# Altium footprint library IC-QFN.PcbLib: 94 footprints (part 5 of 6)
Each footprint in its own frame and in the unit in brackets; x right, y up, seen from the top. Pads: shape width x height; smd on the part's side, far side on the other; paste and mask are expansions set on the pad; w line width, h text height; cw(c..) or ccw(c..) is an arc to the next point about the centre after c.
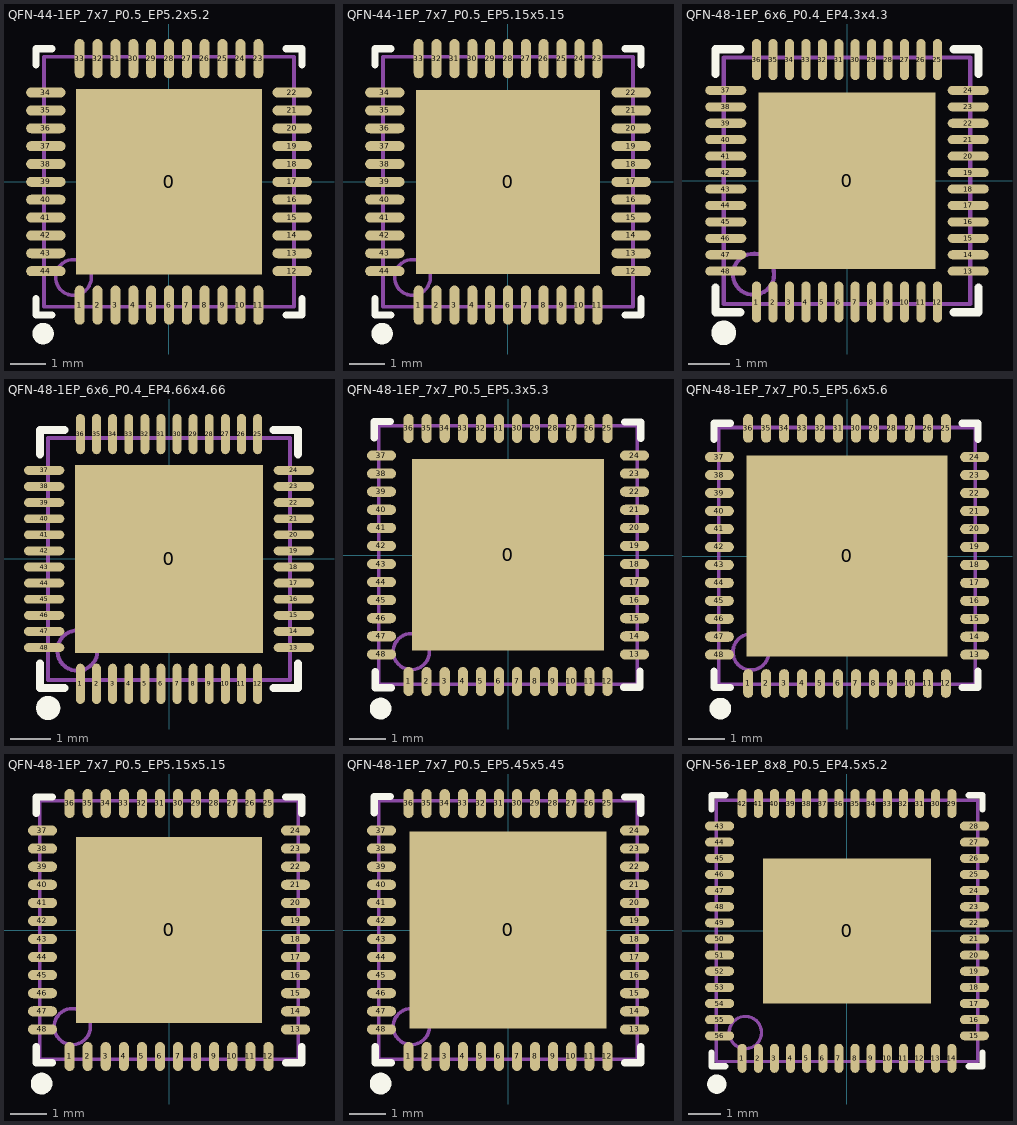
[diagram p4: the footprints below, top view; thin cyan lines are the x and y axes]

## QFN-44-1EP_7x7_P0.5_EP5.2x5.2 [mm]
pads (45):
  rect 5.2x5.2 smd mask+0.051: 0(0,0)
  oval 0.28x1.1 smd mask+0.051: 1(-2.5,-3.45) 2(-2,-3.45) 3(-1.5,-3.45) 4(-1,-3.45) 5(-0.5,-3.45) 6(0,-3.45) 7(0.5,-3.45) 8(1,-3.45) 9(1.5,-3.45) 10(2,-3.45) 11(2.5,-3.45) 23(2.5,3.45) 24(2,3.45) 25(1.5,3.45) 26(1,3.45) 27(0.5,3.45) 28(0,3.45) 29(-0.5,3.45) 30(-1,3.45) 31(-1.5,3.45) 32(-2,3.45) 33(-2.5,3.45)
  oval 1.1x0.28 smd mask+0.051: 12(3.45,-2.5) 13(3.45,-2) 14(3.45,-1.5) 15(3.45,-1) 16(3.45,-0.5) 17(3.45,0) 18(3.45,0.5) 19(3.45,1) 20(3.45,1.5) 21(3.45,2) 22(3.45,2.5) 34(-3.45,2.5) 35(-3.45,2) 36(-3.45,1.5) 37(-3.45,1) 38(-3.45,0.5) 39(-3.45,0) 40(-3.45,-0.5) 41(-3.45,-1) 42(-3.45,-1.5) 43(-3.45,-2) 44(-3.45,-2.5)
Top Overlay:
  circle w0.3: c-3.525,-4.25 r0.15
  lines w0.2: -3.725,-3.275 -3.725,-3.725 -3.275,-3.725 ; -3.725,3.275 -3.725,3.725 -3.275,3.725 ; 3.275,-3.725 3.725,-3.725 3.725,-3.275 ; 3.275,3.725 3.725,3.725 3.725,3.275
Mechanical 13:
  circle w0.1: c-2.675,-2.675 r0.5
  lines w0.1: -3.5,-3.5 3.5,-3.5 3.5,3.5 -3.5,3.5 -3.5,-3.5
3D body "QFN-44-1EP_7x7mm_P0.5mm_EP5.2x5.2mm.step": height 1.1, standoff 0, extent -3.5,-3.5 3.5,3.5

## QFN-44-1EP_7x7_P0.5_EP5.15x5.15 [mm]
pads (45):
  rect 5.15x5.15 smd mask+0.051: 0(0,0)
  oval 0.28x1.1 smd mask+0.051: 1(-2.5,-3.45) 2(-2,-3.45) 3(-1.5,-3.45) 4(-1,-3.45) 5(-0.5,-3.45) 6(0,-3.45) 7(0.5,-3.45) 8(1,-3.45) 9(1.5,-3.45) 10(2,-3.45) 11(2.5,-3.45) 23(2.5,3.45) 24(2,3.45) 25(1.5,3.45) 26(1,3.45) 27(0.5,3.45) 28(0,3.45) 29(-0.5,3.45) 30(-1,3.45) 31(-1.5,3.45) 32(-2,3.45) 33(-2.5,3.45)
  oval 1.1x0.28 smd mask+0.051: 12(3.45,-2.5) 13(3.45,-2) 14(3.45,-1.5) 15(3.45,-1) 16(3.45,-0.5) 17(3.45,0) 18(3.45,0.5) 19(3.45,1) 20(3.45,1.5) 21(3.45,2) 22(3.45,2.5) 34(-3.45,2.5) 35(-3.45,2) 36(-3.45,1.5) 37(-3.45,1) 38(-3.45,0.5) 39(-3.45,0) 40(-3.45,-0.5) 41(-3.45,-1) 42(-3.45,-1.5) 43(-3.45,-2) 44(-3.45,-2.5)
Top Overlay:
  circle w0.3: c-3.525,-4.25 r0.15
  lines w0.2: -3.725,-3.275 -3.725,-3.725 -3.275,-3.725 ; -3.725,3.275 -3.725,3.725 -3.275,3.725 ; 3.275,-3.725 3.725,-3.725 3.725,-3.275 ; 3.275,3.725 3.725,3.725 3.725,3.275
Mechanical 13:
  circle w0.1: c-2.675,-2.675 r0.5
  lines w0.1: -3.5,-3.5 3.5,-3.5 3.5,3.5 -3.5,3.5 -3.5,-3.5
3D body "QFN-44-1EP_7x7mm_P0.5mm_EP5.15x5.15mm.step": height 0.77, standoff 0, extent -3.5,-3.5 3.5,3.5

## QFN-44-1EP_8x8_P0.65_EP6.6x6.6 [mm]

## QFN-44-1EP_8x8_P0.65_EP6.45x6.45 [mm]

## QFN-44-1EP_9x9_P0.65_EP7.5x7.5 [mm]

## QFN-48-1EP_5x5_P0.35_EP3.7x3.7 [mm]

## QFN-48-1EP_6x6_P0.4_EP4.3x4.3 [mm]
pads (49):
  rect 4.3x4.3 smd mask+0.051: 0(0,0)
  oval 0.22x1 smd mask+0.051: 1(-2.2,-2.95) 2(-1.8,-2.95) 3(-1.4,-2.95) 4(-1,-2.95) 5(-0.6,-2.95) 6(-0.2,-2.95) 7(0.2,-2.95) 8(0.6,-2.95) 9(1,-2.95) 10(1.4,-2.95) 11(1.8,-2.95) 12(2.2,-2.95) 25(2.2,2.95) 26(1.8,2.95) 27(1.4,2.95) 28(1,2.95) 29(0.6,2.95) 30(0.2,2.95) 31(-0.2,2.95) 32(-0.6,2.95) 33(-1,2.95) 34(-1.4,2.95) 35(-1.8,2.95) 36(-2.2,2.95)
  oval 1x0.22 smd mask+0.051: 13(2.95,-2.2) 14(2.95,-1.8) 15(2.95,-1.4) 16(2.95,-1) 17(2.95,-0.6) 18(2.95,-0.2) 19(2.95,0.2) 20(2.95,0.6) 21(2.95,1) 22(2.95,1.4) 23(2.95,1.8) 24(2.95,2.2) 37(-2.95,2.2) 38(-2.95,1.8) 39(-2.95,1.4) 40(-2.95,1) 41(-2.95,0.6) 42(-2.95,0.2) 43(-2.95,-0.2) 44(-2.95,-0.6) 45(-2.95,-1) 46(-2.95,-1.4) 47(-2.95,-1.8) 48(-2.95,-2.2)
Top Overlay:
  circle w0.3: c-3,-3.7 r0.15
  lines w0.2: -3.2,-2.6 -3.2,-3.2 -2.6,-3.2 ; -3.2,2.6 -3.2,3.2 -2.6,3.2 ; 2.6,-3.2 3.2,-3.2 3.2,-2.6 ; 2.6,3.2 3.2,3.2 3.2,2.6
Mechanical 13:
  circle w0.1: c-2.275,-2.275 r0.5
  lines w0.1: -3,-3 3,-3 3,3 -3,3 -3,-3
3D body "QFN-48-1EP_6x6mm_P0.4mm_EP4.3x4.3mm.step": height 1.1, standoff 0, extent -3,-3 3,3

## QFN-48-1EP_6x6_P0.4_EP4.66x4.66 [mm]
pads (49):
  rect 4.66x4.66 smd mask+0.051: 0(0,0)
  oval 0.22x1 smd mask+0.051: 1(-2.2,-3.1) 2(-1.8,-3.1) 3(-1.4,-3.1) 4(-1,-3.1) 5(-0.6,-3.1) 6(-0.2,-3.1) 7(0.2,-3.1) 8(0.6,-3.1) 9(1,-3.1) 10(1.4,-3.1) 11(1.8,-3.1) 12(2.2,-3.1) 25(2.2,3.1) 26(1.8,3.1) 27(1.4,3.1) 28(1,3.1) 29(0.6,3.1) 30(0.2,3.1) 31(-0.2,3.1) 32(-0.6,3.1) 33(-1,3.1) 34(-1.4,3.1) 35(-1.8,3.1) 36(-2.2,3.1)
  oval 1x0.22 smd mask+0.051: 13(3.1,-2.2) 14(3.1,-1.8) 15(3.1,-1.4) 16(3.1,-1) 17(3.1,-0.6) 18(3.1,-0.2) 19(3.1,0.2) 20(3.1,0.6) 21(3.1,1) 22(3.1,1.4) 23(3.1,1.8) 24(3.1,2.2) 37(-3.1,2.2) 38(-3.1,1.8) 39(-3.1,1.4) 40(-3.1,1) 41(-3.1,0.6) 42(-3.1,0.2) 43(-3.1,-0.2) 44(-3.1,-0.6) 45(-3.1,-1) 46(-3.1,-1.4) 47(-3.1,-1.8) 48(-3.1,-2.2)
Top Overlay:
  circle w0.3: c-3,-3.7 r0.15
  lines w0.2: -3.2,-2.6 -3.2,-3.2 -2.6,-3.2 ; -3.2,2.6 -3.2,3.2 -2.6,3.2 ; 2.6,-3.2 3.2,-3.2 3.2,-2.6 ; 2.6,3.2 3.2,3.2 3.2,2.6
Mechanical 13:
  circle w0.1: c-2.275,-2.275 r0.5
  lines w0.1: -3,-3 3,-3 3,3 -3,3 -3,-3
3D body "QFN-48-1EP_6x6mm_P0.4mm_EP4.66x4.66mm.step": height 1.1, standoff 0, extent -3,-3 3,3

## QFN-48-1EP_7x7_P0.5_EP5.3x5.3 [mm]
pads (49):
  rect 5.3x5.3 smd mask+0.051: 0(0,0.01)
  oval 0.28x0.8 smd mask+0.051: 1(-2.75,-3.49) 2(-2.25,-3.49) 3(-1.75,-3.49) 4(-1.25,-3.49) 5(-0.75,-3.49) 6(-0.25,-3.49) 7(0.25,-3.49) 8(0.75,-3.49) 9(1.25,-3.49) 10(1.75,-3.49) 11(2.25,-3.49) 12(2.75,-3.49) 25(2.75,3.51) 26(2.25,3.51) 27(1.75,3.51) 28(1.25,3.51) 29(0.75,3.51) 30(0.25,3.51) 31(-0.25,3.51) 32(-0.75,3.51) 33(-1.25,3.51) 34(-1.75,3.51) 35(-2.25,3.51) 36(-2.75,3.51)
  oval 0.8x0.28 smd mask+0.051: 13(3.5,-2.74) 14(3.5,-2.24) 15(3.5,-1.74) 16(3.5,-1.24) 17(3.5,-0.74) 18(3.5,-0.24) 19(3.5,0.26) 20(3.5,0.76) 21(3.5,1.26) 22(3.5,1.76) 23(3.5,2.26) 24(3.5,2.76) 37(-3.5,2.76) 38(-3.5,2.26) 39(-3.5,1.76) 40(-3.5,1.26) 41(-3.5,0.76) 42(-3.5,0.26) 43(-3.5,-0.24) 44(-3.5,-0.74) 45(-3.5,-1.24) 46(-3.5,-1.74) 47(-3.5,-2.24) 48(-3.5,-2.74)
Top Overlay:
  circle w0.3: c-3.525,-4.24 r0.15
  lines w0.2: -3.7,3.25 -3.7,3.7 -3.25,3.7 ; -3.675,-3.215 -3.675,-3.665 -3.225,-3.665 ; 3.2,-3.65 3.65,-3.65 3.65,-3.2 ; 3.225,3.685 3.675,3.685 3.675,3.235
Mechanical 13:
  circle w0.1: c-2.675,-2.665 r0.5
  lines w0.1: -3.575,-3.565 -3.575,3.585 3.575,3.585 3.575,-3.565 -3.575,-3.565
3D body "QFN-48-1EP_7x7mm_P0.5mm_EP5.3x5.3mm.step": height 1.1, standoff 0, extent -3.5,-3.5 3.5,3.5

## QFN-48-1EP_7x7_P0.5_EP5.6x5.6 [mm]
pads (49):
  rect 5.6x5.6 smd mask+0.051: 0(0,0.01)
  oval 0.28x0.8 smd mask+0.051: 1(-2.75,-3.54) 2(-2.25,-3.54) 3(-1.75,-3.54) 4(-1.25,-3.54) 5(-0.75,-3.54) 6(-0.25,-3.54) 7(0.25,-3.54) 8(0.75,-3.54) 9(1.25,-3.54) 10(1.75,-3.54) 11(2.25,-3.54) 12(2.75,-3.54) 25(2.75,3.56) 26(2.25,3.56) 27(1.75,3.56) 28(1.25,3.56) 29(0.75,3.56) 30(0.25,3.56) 31(-0.25,3.56) 32(-0.75,3.56) 33(-1.25,3.56) 34(-1.75,3.56) 35(-2.25,3.56) 36(-2.75,3.56)
  oval 0.8x0.28 smd mask+0.051: 13(3.55,-2.74) 14(3.55,-2.24) 15(3.55,-1.74) 16(3.55,-1.24) 17(3.55,-0.74) 18(3.55,-0.24) 19(3.55,0.26) 20(3.55,0.76) 21(3.55,1.26) 22(3.55,1.76) 23(3.55,2.26) 24(3.55,2.76) 37(-3.55,2.76) 38(-3.55,2.26) 39(-3.55,1.76) 40(-3.55,1.26) 41(-3.55,0.76) 42(-3.55,0.26) 43(-3.55,-0.24) 44(-3.55,-0.74) 45(-3.55,-1.24) 46(-3.55,-1.74) 47(-3.55,-2.24) 48(-3.55,-2.74)
Top Overlay:
  circle w0.3: c-3.525,-4.24 r0.15
  lines w0.2: -3.7,-3.2 -3.7,-3.65 -3.25,-3.65 ; -3.7,3.25 -3.7,3.7 -3.25,3.7 ; 3.2,-3.65 3.65,-3.65 3.65,-3.2 ; 3.2,3.7 3.65,3.7 3.65,3.25
Mechanical 13:
  circle w0.1: c-2.675,-2.665 r0.5
  lines w0.1: -3.575,-3.565 3.575,-3.565 3.575,3.585 -3.575,3.585 -3.575,-3.565
3D body "QFN-48-1EP_7x7mm_P0.5mm_EP5.6x5.6mm.step": height 1.1, standoff 0, extent -3.5,-3.5 3.5,3.5

## QFN-48-1EP_7x7_P0.5_EP5.15x5.15 [mm]
pads (49):
  rect 5.15x5.15 smd mask+0.051: 0(0,0.01)
  oval 0.28x0.8 smd mask+0.051: 1(-2.75,-3.49) 2(-2.25,-3.49) 3(-1.75,-3.49) 4(-1.25,-3.49) 5(-0.75,-3.49) 6(-0.25,-3.49) 7(0.25,-3.49) 8(0.75,-3.49) 9(1.25,-3.49) 10(1.75,-3.49) 11(2.25,-3.49) 12(2.75,-3.49) 25(2.75,3.51) 26(2.25,3.51) 27(1.75,3.51) 28(1.25,3.51) 29(0.75,3.51) 30(0.25,3.51) 31(-0.25,3.51) 32(-0.75,3.51) 33(-1.25,3.51) 34(-1.75,3.51) 35(-2.25,3.51) 36(-2.75,3.51)
  oval 0.8x0.28 smd mask+0.051: 13(3.5,-2.74) 14(3.5,-2.24) 15(3.5,-1.74) 16(3.5,-1.24) 17(3.5,-0.74) 18(3.5,-0.24) 19(3.5,0.26) 20(3.5,0.76) 21(3.5,1.26) 22(3.5,1.76) 23(3.5,2.26) 24(3.5,2.76) 37(-3.5,2.76) 38(-3.5,2.26) 39(-3.5,1.76) 40(-3.5,1.26) 41(-3.5,0.76) 42(-3.5,0.26) 43(-3.5,-0.24) 44(-3.5,-0.74) 45(-3.5,-1.24) 46(-3.5,-1.74) 47(-3.5,-2.24) 48(-3.5,-2.74)
Top Overlay:
  circle w0.3: c-3.525,-4.24 r0.15
  lines w0.2: -3.675,-3.215 -3.675,-3.665 -3.225,-3.665 ; -3.675,3.235 -3.675,3.685 -3.225,3.685 ; 3.225,-3.665 3.675,-3.665 3.675,-3.215 ; 3.225,3.685 3.675,3.685 3.675,3.235
Mechanical 13:
  circle w0.1: c-2.675,-2.665 r0.5
  lines w0.1: -3.575,-3.565 3.575,-3.565 3.575,3.585 -3.575,3.585 -3.575,-3.565
3D body "QFN-48-1EP_7x7mm_P0.5mm_EP5.15x5.15mm.step": height 0.77, standoff 0, extent -3.5,-3.5 3.5,3.5

## QFN-48-1EP_7x7_P0.5_EP5.45x5.45 [mm]
pads (49):
  rect 5.45x5.45 smd mask+0.051: 0(0,0.01)
  oval 0.28x0.8 smd mask+0.051: 1(-2.75,-3.49) 2(-2.25,-3.49) 3(-1.75,-3.49) 4(-1.25,-3.49) 5(-0.75,-3.49) 6(-0.25,-3.49) 7(0.25,-3.49) 8(0.75,-3.49) 9(1.25,-3.49) 10(1.75,-3.49) 11(2.25,-3.49) 12(2.75,-3.49) 25(2.75,3.51) 26(2.25,3.51) 27(1.75,3.51) 28(1.25,3.51) 29(0.75,3.51) 30(0.25,3.51) 31(-0.25,3.51) 32(-0.75,3.51) 33(-1.25,3.51) 34(-1.75,3.51) 35(-2.25,3.51) 36(-2.75,3.51)
  oval 0.8x0.28 smd mask+0.051: 13(3.5,-2.74) 14(3.5,-2.24) 15(3.5,-1.74) 16(3.5,-1.24) 17(3.5,-0.74) 18(3.5,-0.24) 19(3.5,0.26) 20(3.5,0.76) 21(3.5,1.26) 22(3.5,1.76) 23(3.5,2.26) 24(3.5,2.76) 37(-3.5,2.76) 38(-3.5,2.26) 39(-3.5,1.76) 40(-3.5,1.26) 41(-3.5,0.76) 42(-3.5,0.26) 43(-3.5,-0.24) 44(-3.5,-0.74) 45(-3.5,-1.24) 46(-3.5,-1.74) 47(-3.5,-2.24) 48(-3.5,-2.74)
Top Overlay:
  circle w0.3: c-3.525,-4.24 r0.15
  lines w0.2: -3.7,3.25 -3.7,3.7 -3.25,3.7 ; -3.675,-3.215 -3.675,-3.665 -3.225,-3.665 ; 3.225,-3.665 3.675,-3.665 3.675,-3.215 ; 3.225,3.685 3.675,3.685 3.675,3.235
Mechanical 13:
  circle w0.1: c-2.675,-2.665 r0.5
  lines w0.1: -3.575,-3.565 -3.575,3.585 3.575,3.585 3.575,-3.565 -3.575,-3.565
3D body "QFN-48-1EP_7x7mm_P0.5mm_EP5.45x5.45mm.step": height 1.1, standoff 0, extent -3.5,-3.5 3.5,3.5

## QFN-52-1EP_7x8_P0.5_EP5.41x6.45 [mm]

## QFN-56-1EP_7x7_P0.4_EP5.6x5.6 [mm]

## QFN-56-1EP_7x7_P0.4_EP5.7x5.7 [mm]

## QFN-56-1EP_8x8_P0.5_EP4.5x5.2 [mm]
pads (57):
  rect 5.2x4.5 smd mask+0.051: 0(0,0)
  oval 0.28x0.9 smd mask+0.051: 1(-3.25,-3.95) 2(-2.75,-3.95) 3(-2.25,-3.95) 4(-1.75,-3.95) 5(-1.25,-3.95) 6(-0.75,-3.95) 7(-0.25,-3.95) 8(0.25,-3.95) 9(0.75,-3.95) 10(1.25,-3.95) 11(1.75,-3.95) 12(2.25,-3.95) 13(2.75,-3.95) 14(3.25,-3.95) 29(3.25,3.95) 30(2.75,3.95) 31(2.25,3.95) 32(1.75,3.95) 33(1.25,3.95) 34(0.75,3.95) 35(0.25,3.95) 36(-0.25,3.95) 37(-0.75,3.95) 38(-1.25,3.95) 39(-1.75,3.95) 40(-2.25,3.95) 41(-2.75,3.95) 42(-3.25,3.95)
  oval 0.9x0.28 smd mask+0.051: 15(3.95,-3.25) 16(3.95,-2.75) 17(3.95,-2.25) 18(3.95,-1.75) 19(3.95,-1.25) 20(3.95,-0.75) 21(3.95,-0.25) 22(3.95,0.25) 23(3.95,0.75) 24(3.95,1.25) 25(3.95,1.75) 26(3.95,2.25) 27(3.95,2.75) 28(3.95,3.25) 43(-3.95,3.25) 44(-3.95,2.75) 45(-3.95,2.25) 46(-3.95,1.75) 47(-3.95,1.25) 48(-3.95,0.75) 49(-3.95,0.25) 50(-3.95,-0.25) 51(-3.95,-0.75) 52(-3.95,-1.25) 53(-3.95,-1.75) 54(-3.95,-2.25) 55(-3.95,-2.75) 56(-3.95,-3.25)
Top Overlay:
  circle w0.3: c-4.035,-4.75 r0.15
  lines w0.2: -4.2,-3.775 -4.2,-4.2 -3.775,-4.2 ; -4.2,3.775 -4.2,4.2 -3.775,4.2 ; 3.775,-4.2 4.2,-4.2 4.2,-3.775 ; 3.775,4.2 4.2,4.2 4.2,3.775
Mechanical 13:
  circle w0.1: c-3.15,-3.15 r0.5
  lines w0.1: -4.05,-4.05 -4.05,4.05 4.05,4.05 4.05,-4.05 -4.05,-4.05
3D body "QFN-56-1EP_8x8mm_P0.5mm_EP4.5x5.2mm.step": height 1, standoff 0, extent -4,-4 4,4